# Altium footprint library WE-D-SUB.PcbLib: 41 footprints (part 1 of 3)
Each footprint in its own frame and in the unit in brackets; x right, y up, seen from the top. Pads: shape width x height; smd on the part's side, far side on the other; paste and mask are expansions set on the pad; w line width, h text height; cw(c..) or ccw(c..) is an arc to the next point about the centre after c.
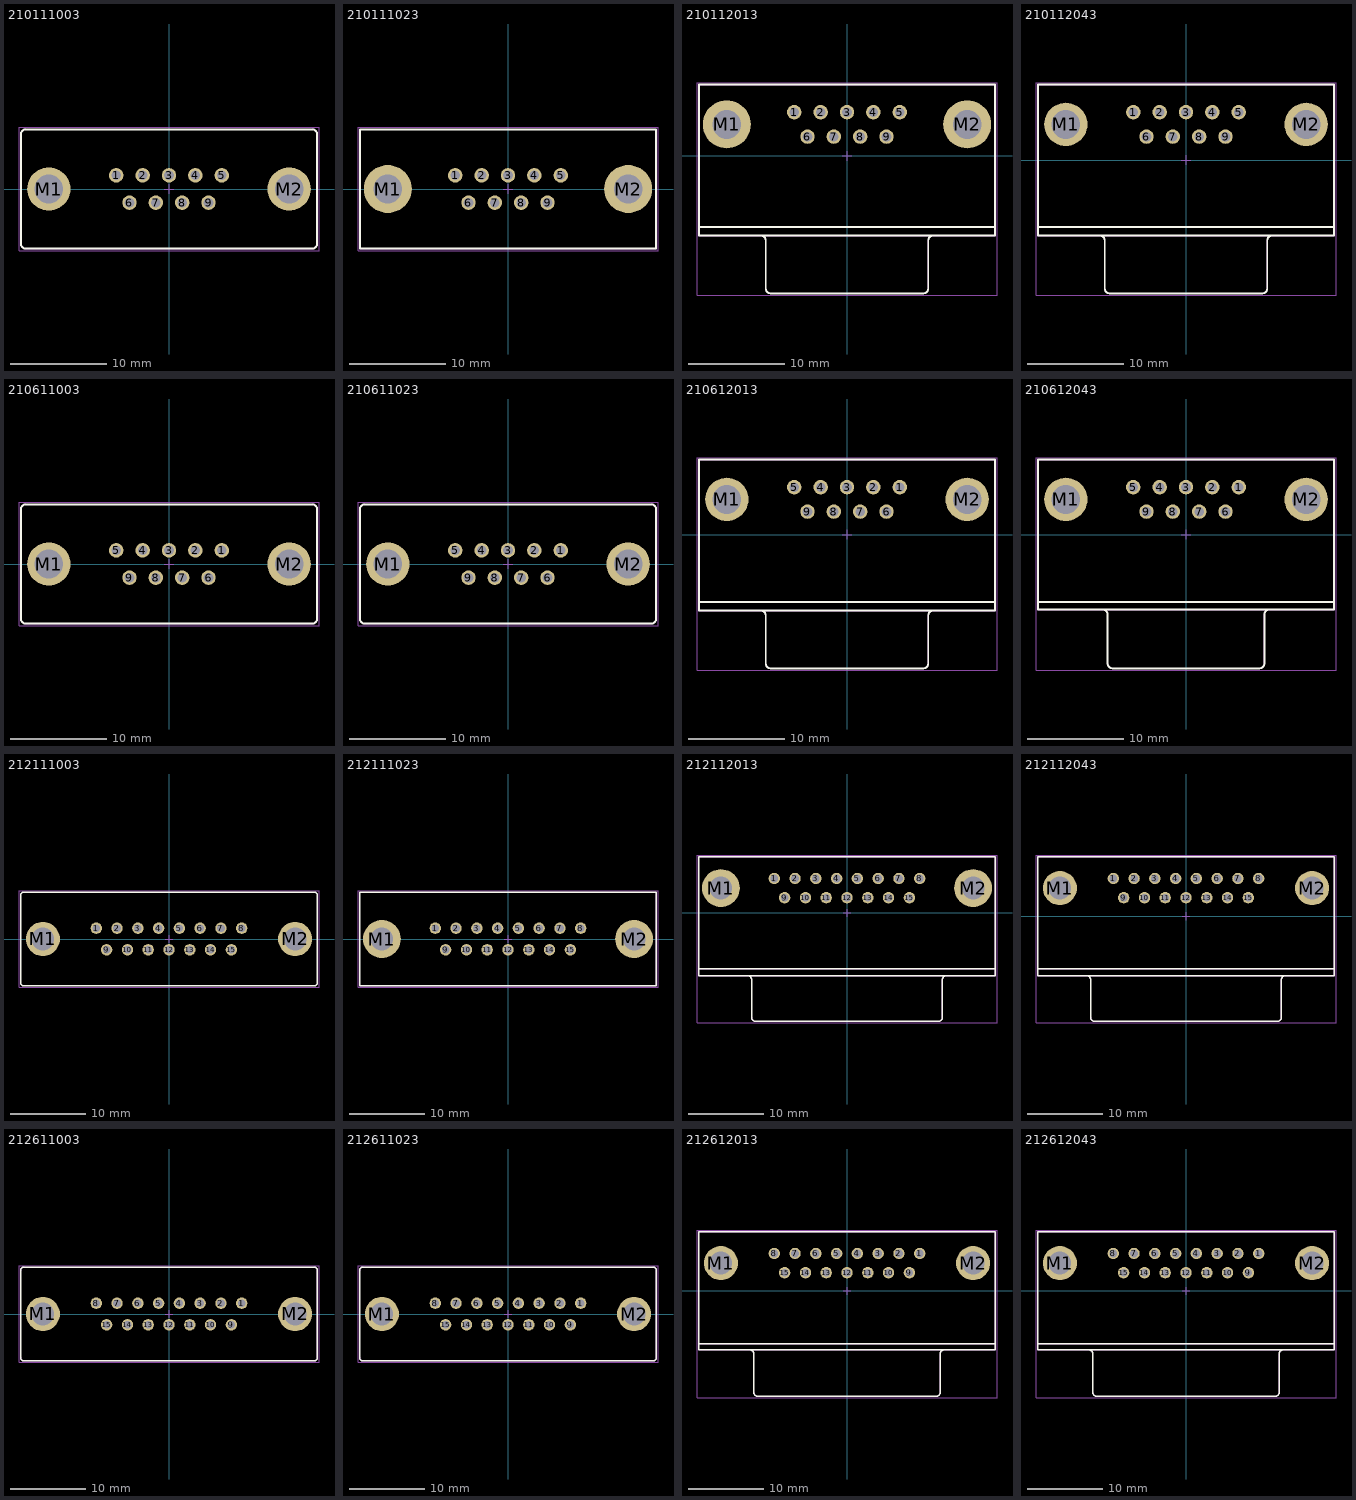
[diagram p0: the footprints below, top view; thin cyan lines are the x and y axes]

## 210111003 [mm] "D-SUB-Filter, Solder Pin Straight, Male, 09p"
height 12.2
pads (11):
  round 1.5 hole 1: 1(-5.49,1.42) 2(-2.74,1.42) 3(0,1.42) 4(2.74,1.42) 5(5.49,1.42) 6(-4.11,-1.42) 7(-1.37,-1.42) 8(1.37,-1.42) 9(4.11,-1.42)
  round 4.5 hole 3: M1(-12.5,0) M2(12.5,0)
Top Overlay:
  lines w0.2: 14.9,-6.2 ccw(c14.9,-5.7) 15.4,-5.7 15.4,5.7 ccw(c14.9,5.7) 14.9,6.2 ; 14.9,-6.2 -14.9,-6.2 cw(c-14.9,-5.7) -15.4,-5.7 -15.4,5.7 cw(c-14.9,5.7) -14.9,6.2 14.9,6.2 ; 14.9,-6.2 14.9,-6.2 ; 14.9,6.2 14.9,6.2
Top 3D Body:
  lines w0.1: 14.9,-6.2 ccw(c14.9,-5.7) 15.4,-5.7 15.4,5.7 ccw(c14.9,5.7) 14.9,6.2 ; 14.9,-6.2 14.9,-6.2 ; 14.9,-6.2 -14.9,-6.2 cw(c-14.9,-5.7) -15.4,-5.7 -15.4,5.7 cw(c-14.9,5.7) -14.9,6.2 14.9,6.2 ; 14.9,6.2 14.9,6.2
Top Courtyard:
  lines w0.05: -0.5,0 0.5,0 ; 0,-0.5 0,0.5 ; -15.6,-6.4 -15.6,6.4 15.6,6.4 15.6,-6.4 -15.6,-6.4
3D body "210111003.stp": height 11.9, standoff -5.1, extent -15.4,-6.2 15.4,6.2

## 210111023 [mm] "D-SUB-Filter, Solder Pin Straight, Male, 9p"
height 11.8
pads (11):
  round 1.5 hole 1: 1(-5.49,1.42) 2(-2.74,1.42) 3(0,1.42) 4(2.74,1.42) 5(5.49,1.42) 6(-4.11,-1.42) 7(-1.37,-1.42) 8(1.37,-1.42) 9(4.11,-1.42)
  round 5 hole 3: M1(-12.5,0) M2(12.5,0)
Top Overlay:
  lines w0.2: -15.4,-6.2 15.4,-6.2 15.4,6.2 -15.4,6.2 -15.4,-6.2
Top 3D Body:
  lines w0.1: -15.4,-6.2 -15.4,6.2 15.4,6.2 15.4,-6.2 -15.4,-6.2
Top Courtyard:
  lines w0.05: -0.5,0 0.5,0 ; 0,-0.5 0,0.5 ; -15.6,-6.4 -15.6,6.4 15.6,6.4 15.6,-6.4 -15.6,-6.4
3D body "210111023.stp": height 11.9, standoff -5.1, extent -15.4,-6.2 15.4,6.2

## 210112013 [mm] "D-SUB-Filter, Solder Pin Angled,  Male, 9p"
height 12.4
pads (11):
  round 1.5 hole 1: 1(-5.49,4.54) 2(-2.74,4.54) 3(0,4.54) 4(2.74,4.54) 5(5.49,4.54) 6(-4.11,2) 7(-1.37,2) 8(1.37,2) 9(4.11,2)
  round 5 hole 3: M1(-12.5,3.27) M2(12.5,3.27)
Top Overlay:
  lines w0.2: -15.4,-7.4 15.4,-7.4 ; -8.95,-8.3 cw(c-8.95,-8.8) -8.45,-8.8 -8.45,-13.8 ccw(c-7.95,-13.8) -7.95,-14.3 7.95,-14.3 ccw(c7.95,-13.8) 8.45,-13.8 8.45,-8.8 cw(c8.95,-8.8) 8.95,-8.3 ; -15.4,-8.3 -15.4,7.4 15.4,7.4 15.4,-8.3 -15.4,-8.3
Top 3D Body:
  lines w0.1: -15.4,-7.4 15.4,-7.4 ; -8.95,-8.3 cw(c-8.95,-8.8) -8.45,-8.8 -8.45,-13.8 ccw(c-7.95,-13.8) -7.95,-14.3 7.95,-14.3 ccw(c7.95,-13.8) 8.45,-13.8 8.45,-8.8 cw(c8.95,-8.8) 8.95,-8.3 ; -15.4,-8.3 15.4,-8.3 15.4,7.4 -15.4,7.4 -15.4,-8.3
Top Courtyard:
  lines w0.05: -0.5,0 0.5,0 ; 0,-0.5 0,0.5 ; -15.6,-14.5 -15.6,7.6 15.6,7.6 15.6,-14.5 -15.6,-14.5
3D body "210112013.stp": height 13.65, standoff -3.55, extent -15.4,-14.3 15.4,7.4

## 210112043 [mm] "D-SUB-Filter Bent 90¡ã THT, Male, 09p"
height 12.4
pads (11):
  round 1.5 hole 1: 1(-5.48,4.99) 2(-2.74,4.99) 3(0,4.99) 4(2.74,4.99) 5(5.48,4.99) 6(-4.11,2.45) 7(-1.37,2.45) 8(1.37,2.45) 9(4.11,2.45)
  round 4.5 hole 3: M1(-12.5,3.72) M2(12.5,3.72)
Top Overlay:
  lines w0.2: -15.4,-6.95 15.4,-6.95 ; -8.95,-7.85 cw(c-8.95,-8.35) -8.45,-8.35 -8.45,-13.35 ccw(c-7.95,-13.35) -7.95,-13.85 7.95,-13.85 ccw(c7.95,-13.35) 8.45,-13.35 8.45,-8.35 cw(c8.95,-8.35) 8.95,-7.85 ; -15.4,-7.85 -15.4,7.85 15.4,7.85 15.4,-7.85 -15.4,-7.85
Top 3D Body:
  lines w0.1: -15.4,-6.95 15.4,-6.95 ; -8.95,-7.85 cw(c-8.95,-8.35) -8.45,-8.35 -8.45,-13.35 ccw(c-7.95,-13.35) -7.95,-13.85 7.95,-13.85 ccw(c7.95,-13.35) 8.45,-13.35 8.45,-8.35 cw(c8.95,-8.35) 8.95,-7.85 ; -15.4,-7.85 15.4,-7.85 15.4,7.85 -15.4,7.85 -15.4,-7.85
Top Courtyard:
  lines w0.05: -0.5,0 0.5,0 ; 0,-0.5 0,0.5 ; -15.6,-14.05 -15.6,8.05 15.6,8.05 15.6,-14.05 -15.6,-14.05
3D body "210112043.stp": height 13.75, standoff -3.05, extent -15.4,-13.85 15.4,7.85

## 210611003 [mm] "D-SUB-Filter, Solder Pin Straight, Female, 09p"
height 12.2
pads (11):
  round 1.5 hole 1: 1(5.49,1.42) 2(2.74,1.42) 3(0,1.42) 4(-2.74,1.42) 5(-5.49,1.42) 6(4.11,-1.42) 7(1.37,-1.42) 8(-1.37,-1.42) 9(-4.11,-1.42)
  round 4.5 hole 3: M1(-12.5,0) M2(12.5,0)
Top Overlay:
  lines w0.2: -15.4,-5.7 ccw(c-14.9,-5.7) -14.9,-6.2 14.9,-6.2 ccw(c14.9,-5.7) 15.4,-5.7 15.4,5.7 ccw(c14.9,5.7) 14.9,6.2 -14.9,6.2 ccw(c-14.9,5.7) -15.4,5.7 -15.4,-5.7
Top 3D Body:
  lines w0.1: -15.4,-5.7 ccw(c-14.9,-5.7) -14.9,-6.2 14.9,-6.2 ccw(c14.9,-5.7) 15.4,-5.7 15.4,5.7 ccw(c14.9,5.7) 14.9,6.2 -14.9,6.2 ccw(c-14.9,5.7) -15.4,5.7 -15.4,-5.7
Top Courtyard:
  lines w0.05: -0.5,0 0.5,0 ; 0,-0.5 0,0.5 ; -15.6,-6.4 15.6,-6.4 15.6,6.4 -15.6,6.4 -15.6,-6.4
3D body "210611003.stp": height 11.9, standoff -5.1, extent -15.4,-6.2 15.4,6.2

## 210611023 [mm] "D-SUB-Filter, Solder Pin Straight, Female, 09p"
height 11.8
pads (11):
  round 1.5 hole 1: 1(5.49,1.42) 2(2.74,1.42) 3(0,1.42) 4(-2.74,1.42) 5(-5.49,1.42) 6(4.11,-1.42) 7(1.37,-1.42) 8(-1.37,-1.42) 9(-4.11,-1.42)
  round 4.5 hole 3: M1(-12.5,0) M2(12.5,0)
Top Overlay:
  lines w0.2: -15.4,-5.7 ccw(c-14.9,-5.7) -14.9,-6.2 14.9,-6.2 ccw(c14.9,-5.7) 15.4,-5.7 15.4,5.7 ccw(c14.9,5.7) 14.9,6.2 -14.9,6.2 ccw(c-14.9,5.7) -15.4,5.7 -15.4,-5.7
Top 3D Body:
  lines w0.1: -15.4,-5.7 ccw(c-14.9,-5.7) -14.9,-6.2 14.9,-6.2 ccw(c14.9,-5.7) 15.4,-5.7 15.4,5.7 ccw(c14.9,5.7) 14.9,6.2 -14.9,6.2 ccw(c-14.9,5.7) -15.4,5.7 -15.4,-5.7
Top Courtyard:
  lines w0.05: -0.5,0 0.5,0 ; 0,-0.5 0,0.5 ; -15.6,-6.4 -15.6,6.4 15.6,6.4 15.6,-6.4 -15.6,-6.4
3D body "210611023.stp": height 11.9, standoff -5.1, extent -15.4,-6.2 15.4,6.2

## 210612013 [mm] "D-SUB-Filter Bent 90¡ã THT, Female, 09p"
height 12.4
pads (11):
  round 1.5 hole 1: 1(5.49,4.94) 2(2.74,4.94) 3(0,4.94) 4(-2.74,4.94) 5(-5.49,4.94) 6(4.11,2.4) 7(1.37,2.4) 8(-1.37,2.4) 9(-4.11,2.4)
  round 4.5 hole 3: M1(-12.5,3.67) M2(12.5,3.67)
Top Overlay:
  lines w0.2: -15.4,-7 15.4,-7 ; -8.95,-7.9 cw(c-8.95,-8.4) -8.45,-8.4 -8.45,-13.4 ccw(c-7.95,-13.4) -7.95,-13.9 7.95,-13.9 ccw(c7.95,-13.4) 8.45,-13.4 8.45,-8.4 cw(c8.95,-8.4) 8.95,-7.9 ; -15.4,-7.9 -15.4,7.8 15.4,7.8 15.4,-7.9 -15.4,-7.9
Top 3D Body:
  lines w0.1: -15.4,-7 15.4,-7 ; -8.95,-7.9 cw(c-8.95,-8.4) -8.45,-8.4 -8.45,-13.4 ccw(c-7.95,-13.4) -7.95,-13.9 7.95,-13.9 ccw(c7.95,-13.4) 8.45,-13.4 8.45,-8.4 cw(c8.95,-8.4) 8.95,-7.9 ; -15.4,-7.9 15.4,-7.9 15.4,7.8 -15.4,7.8 -15.4,-7.9
Top Courtyard:
  lines w0.05: -0.5,0 0.5,0 ; 0,-0.5 0,0.5 ; -15.6,-14.1 -15.6,8 15.6,8 15.6,-14.1 -15.6,-14.1
3D body "210612013.stp": height 13.75, standoff -3.45, extent -15.4,-13.9 15.4,7.8

## 210612043 [mm] "D-SUB-Filter Bent 90¡ã THT, Female, 09p"
height 12.4
pads (11):
  round 1.5 hole 1: 1(5.49,4.94) 2(2.74,4.94) 3(0,4.94) 4(-2.74,4.94) 5(-5.49,4.94) 6(4.11,2.4) 7(1.37,2.4) 8(-1.37,2.4) 9(-4.11,2.4)
  round 4.5 hole 3: M1(-12.5,3.67) M2(12.5,3.67)
Top Overlay:
  lines w0.2: -15.4,-7 15.4,-7 ; -8.65,-7.8 cw(c-8.65,-8.3) -8.15,-8.3 -8.15,-13.4 ccw(c-7.65,-13.4) -7.65,-13.9 7.65,-13.9 ccw(c7.65,-13.4) 8.15,-13.4 8.15,-8.3 cw(c8.65,-8.3) 8.65,-7.8 ; -15.4,-7.8 -15.4,7.8 15.4,7.8 15.4,-7.8 -15.4,-7.8
Top 3D Body:
  lines w0.1: -15.4,-7 15.4,-7 ; -8.65,-7.8 cw(c-8.65,-8.3) -8.15,-8.3 -8.15,-13.4 ccw(c-7.65,-13.4) -7.65,-13.9 7.65,-13.9 ccw(c7.65,-13.4) 8.15,-13.4 8.15,-8.3 cw(c8.65,-8.3) 8.65,-7.8 ; -15.4,-7.8 15.4,-7.8 15.4,7.8 -15.4,7.8 -15.4,-7.8
Top Courtyard:
  lines w0.05: -0.5,0 0.5,0 ; 0,-0.5 0,0.5 ; -15.6,-14.1 -15.6,8 15.6,8 15.6,-14.1 -15.6,-14.1
3D body "210612043.stp": height 13.75, standoff -3.05, extent -15.4,-13.9 15.4,7.8

## 212111003 [mm] "D-SUB-Filter, Solder Pin Straight, Male, 15p"
height 12.2
pads (17):
  round 1.5 hole 1: 1(-9.6,1.42) 2(-6.86,1.42) 3(-4.11,1.42) 4(-1.37,1.42) 5(1.37,1.42) 6(4.11,1.42) 7(6.86,1.42) 8(9.6,1.42) 9(-8.23,-1.42) 10(-5.48,-1.42) 11(-2.74,-1.42) 12(0,-1.42) 13(2.74,-1.42) 14(5.48,-1.42) 15(8.23,-1.42)
  round 4.5 hole 3: M1(-16.65,0) M2(16.65,0)
Top Overlay:
  lines w0.2: -19.6,-5.7 ccw(c-19.1,-5.7) -19.1,-6.2 19.1,-6.2 ccw(c19.1,-5.7) 19.6,-5.7 19.6,5.7 ccw(c19.1,5.7) 19.1,6.2 -19.1,6.2 ccw(c-19.1,5.7) -19.6,5.7 -19.6,-5.7
Top Courtyard:
  lines w0.05: -0.5,0 0.5,0 ; 0,-0.5 0,0.5 ; -19.8,-6.4 -19.8,6.4 19.8,6.4 19.8,-6.4 -19.8,-6.4
3D body "212111003.stp": height 11.9, standoff -5.1, extent -19.6,-6.2 19.6,6.2

## 212111023 [mm] "D-SUB-Filter, Solder Pin Straight, Male, 15p"
height 11.8
pads (17):
  round 1.5 hole 1: 1(-9.6,1.42) 2(-6.86,1.42) 3(-4.11,1.42) 4(-1.37,1.42) 5(1.37,1.42) 6(4.11,1.42) 7(6.86,1.42) 8(9.6,1.42) 9(-8.23,-1.42) 10(-5.48,-1.42) 11(-2.74,-1.42) 12(0,-1.42) 13(2.74,-1.42) 14(5.48,-1.42) 15(8.23,-1.42)
  round 5 hole 3: M1(-16.65,0) M2(16.65,0)
Top Overlay:
  lines w0.2: -19.6,-6.2 19.6,-6.2 19.6,6.2 -19.6,6.2 -19.6,-6.2
Top 3D Body:
  lines w0.1: -19.6,-6.2 -19.6,6.2 19.6,6.2 19.6,-6.2 -19.6,-6.2
Top Courtyard:
  lines w0.05: -0.5,0 0.5,0 ; 0,-0.5 0,0.5 ; -19.8,-6.4 -19.8,6.4 19.8,6.4 19.8,-6.4 -19.8,-6.4
3D body "212111023.stp": height 11.9, standoff -5.1, extent -19.6,-6.2 19.6,6.2

## 212112013 [mm] "D-SUB-Filter, Solder Pin Angled,  Male, 15p"
height 12.4
pads (17):
  round 1.5 hole 1: 1(-9.6,4.54) 2(-6.86,4.54) 3(-4.11,4.54) 4(-1.37,4.54) 5(1.37,4.54) 6(4.11,4.54) 7(6.86,4.54) 8(9.6,4.54) 9(-8.23,2) 10(-5.48,2) 11(-2.74,2) 12(0,2) 13(2.74,2) 14(5.48,2) 15(8.23,2)
  round 5 hole 3: M1(-16.65,3.27) M2(16.65,3.27)
Top Overlay:
  lines w0.2: -19.6,-7.4 19.6,-7.4 ; -13.1,-8.3 cw(c-13.1,-8.8) -12.6,-8.8 -12.6,-13.8 ccw(c-12.1,-13.8) -12.1,-14.3 12.1,-14.3 ccw(c12.1,-13.8) 12.6,-13.8 12.6,-8.8 cw(c13.1,-8.8) 13.1,-8.3 ; -19.6,-8.3 19.6,-8.3 19.6,7.4 -19.6,7.4 -19.6,-8.3
Top 3D Body:
  lines w0.1: -19.6,-7.4 19.6,-7.4 ; -13.1,-8.3 cw(c-13.1,-8.8) -12.6,-8.8 -12.6,-13.8 ccw(c-12.1,-13.8) -12.1,-14.3 12.1,-14.3 ccw(c12.1,-13.8) 12.6,-13.8 12.6,-8.8 cw(c13.1,-8.8) 13.1,-8.3 ; -19.6,-8.3 -19.6,7.4 19.6,7.4 19.6,-8.3 -19.6,-8.3
Top Courtyard:
  lines w0.05: -0.5,0 0.5,0 ; 0,-0.5 0,0.5 ; -19.8,-14.5 19.8,-14.5 19.8,7.6 -19.8,7.6 -19.8,-14.5
3D body "212112013.stp": height 13.65, standoff -3.55, extent -19.6,-14.3 19.6,7.4

## 212112043 [mm] "D-SUB-Filter Bent 90¡ã THT, Male, 15p"
height 12.4
pads (17):
  round 1.5 hole 1: 1(-9.59,4.99) 2(-6.85,4.99) 3(-4.11,4.99) 4(-1.37,4.99) 5(1.37,4.99) 6(4.11,4.99) 7(6.85,4.99) 8(9.59,4.99) 9(-8.22,2.45) 10(-5.48,2.45) 11(-2.74,2.45) 12(0,2.45) 13(2.74,2.45) 14(5.48,2.45) 15(8.22,2.45)
  round 4.5 hole 3: M1(-16.65,3.72) M2(16.65,3.72)
Top Overlay:
  lines w0.2: -19.6,-6.95 19.6,-6.95 ; -13.1,-7.85 cw(c-13.1,-8.35) -12.6,-8.35 -12.6,-13.35 ccw(c-12.1,-13.35) -12.1,-13.85 12.1,-13.85 ccw(c12.1,-13.35) 12.6,-13.35 12.6,-8.35 cw(c13.1,-8.35) 13.1,-7.85 ; -19.6,-7.85 19.6,-7.85 19.6,7.85 -19.6,7.85 -19.6,-7.85
Top 3D Body:
  lines w0.1: -19.6,-6.95 19.6,-6.95 ; -13.1,-7.85 cw(c-13.1,-8.35) -12.6,-8.35 -12.6,-13.35 ccw(c-12.1,-13.35) -12.1,-13.85 12.1,-13.85 ccw(c12.1,-13.35) 12.6,-13.35 12.6,-8.35 cw(c13.1,-8.35) 13.1,-7.85 ; -19.6,-7.85 -19.6,7.85 19.6,7.85 19.6,-7.85 -19.6,-7.85
Top Courtyard:
  lines w0.05: -0.5,0 0.5,0 ; 0,-0.5 0,0.5 ; -19.8,-14.05 -19.8,8.05 19.8,8.05 19.8,-14.05 -19.8,-14.05
3D body "212112043.stp": height 13.75, standoff -3.05, extent -19.6,-13.85 19.6,7.85

## 212611003 [mm] "D-SUB-Filter, Solder Pin Straight, Female, 15p"
height 12.2
pads (17):
  round 1.5 hole 1: 1(9.6,1.42) 2(6.86,1.42) 3(4.11,1.42) 4(1.37,1.42) 5(-1.37,1.42) 6(-4.11,1.42) 7(-6.86,1.42) 8(-9.6,1.42) 9(8.23,-1.42) 10(5.48,-1.42) 11(2.74,-1.42) 12(0,-1.42) 13(-2.74,-1.42) 14(-5.48,-1.42) 15(-8.23,-1.42)
  round 4.5 hole 3: M1(-16.65,0) M2(16.65,0)
Top Overlay:
  lines w0.2: -19.6,-5.7 ccw(c-19.1,-5.7) -19.1,-6.2 19.1,-6.2 ccw(c19.1,-5.7) 19.6,-5.7 19.6,5.7 ccw(c19.1,5.7) 19.1,6.2 -19.1,6.2 ccw(c-19.1,5.7) -19.6,5.7 -19.6,-5.7
Top 3D Body:
  lines w0.1: -19.6,-5.7 ccw(c-19.1,-5.7) -19.1,-6.2 19.1,-6.2 ccw(c19.1,-5.7) 19.6,-5.7 19.6,5.7 ccw(c19.1,5.7) 19.1,6.2 -19.1,6.2 ccw(c-19.1,5.7) -19.6,5.7 -19.6,-5.7
Top Courtyard:
  lines w0.05: -0.5,0 0.5,0 ; 0,-0.5 0,0.5 ; -19.8,-6.4 -19.8,6.4 19.8,6.4 19.8,-6.4 -19.8,-6.4
3D body "212611003.stp": height 11.9, standoff -5.1, extent -19.6,-6.2 19.6,6.2

## 212611023 [mm] "D-SUB-Filter, Solder Pin Straight, Female, 15p"
height 11.8
pads (17):
  round 1.5 hole 1: 1(9.6,1.42) 2(6.86,1.42) 3(4.11,1.42) 4(1.37,1.42) 5(-1.37,1.42) 6(-4.11,1.42) 7(-6.86,1.42) 8(-9.6,1.42) 9(8.23,-1.42) 10(5.48,-1.42) 11(2.74,-1.42) 12(0,-1.42) 13(-2.74,-1.42) 14(-5.48,-1.42) 15(-8.23,-1.42)
  round 4.5 hole 3: M1(-16.65,0) M2(16.65,0)
Top Overlay:
  lines w0.2: -19.6,-5.7 ccw(c-19.1,-5.7) -19.1,-6.2 19.1,-6.2 ccw(c19.1,-5.7) 19.6,-5.7 19.6,5.7 ccw(c19.1,5.7) 19.1,6.2 -19.1,6.2 ccw(c-19.1,5.7) -19.6,5.7 -19.6,-5.7
Top 3D Body:
  lines w0.1: -19.6,-5.7 ccw(c-19.1,-5.7) -19.1,-6.2 19.1,-6.2 ccw(c19.1,-5.7) 19.6,-5.7 19.6,5.7 ccw(c19.1,5.7) 19.1,6.2 -19.1,6.2 ccw(c-19.1,5.7) -19.6,5.7 -19.6,-5.7
Top Courtyard:
  lines w0.05: -0.5,0 0.5,0 ; 0,-0.5 0,0.5 ; -19.8,-6.4 -19.8,6.4 19.8,6.4 19.8,-6.4 -19.8,-6.4
3D body "212611023.stp": height 11.9, standoff -5.1, extent -19.6,-6.2 19.6,6.2

## 212612013 [mm] "D-SUB-Filter Bent 90¡ã THT, Female, 15p"
height 12.4
pads (17):
  round 1.5 hole 1: 1(9.6,4.94) 2(6.86,4.94) 3(4.11,4.94) 4(1.37,4.94) 5(-1.37,4.94) 6(-4.11,4.94) 7(-6.86,4.94) 8(-9.6,4.94) 9(8.23,2.4) 10(5.48,2.4) 11(2.74,2.4) 12(0,2.4) 13(-2.74,2.4) 14(-5.48,2.4) 15(-8.23,2.4)
  round 4.5 hole 3: M1(-16.65,3.67) M2(16.65,3.67)
Top Overlay:
  lines w0.2: -19.6,-7 19.6,-7 ; -12.8,-7.8 cw(c-12.8,-8.3) -12.3,-8.3 -12.3,-13.4 ccw(c-11.8,-13.4) -11.8,-13.9 11.8,-13.9 ccw(c11.8,-13.4) 12.3,-13.4 12.3,-8.3 cw(c12.8,-8.3) 12.8,-7.8 ; -19.6,-7.8 19.6,-7.8 19.6,7.8 -19.6,7.8 -19.6,-7.8
Top 3D Body:
  lines w0.1: -19.6,-7 19.6,-7 ; -12.8,-7.8 cw(c-12.8,-8.3) -12.3,-8.3 -12.3,-13.4 ccw(c-11.8,-13.4) -11.8,-13.9 11.8,-13.9 ccw(c11.8,-13.4) 12.3,-13.4 12.3,-8.3 cw(c12.8,-8.3) 12.8,-7.8 ; -19.6,-7.8 -19.6,7.8 19.6,7.8 19.6,-7.8 -19.6,-7.8
Top Courtyard:
  lines w0.05: -0.5,0 0.5,0 ; 0,-0.5 0,0.5 ; -19.8,-14.1 19.8,-14.1 19.8,8 -19.8,8 -19.8,-14.1
3D body "212612013.stp": height 13.75, standoff -3.45, extent -19.6,-13.9 19.6,7.8

## 212612043 [mm] "D-SUB-Filter Bent 90¡ã THT, Female, 15p"
height 12.4
pads (17):
  round 1.5 hole 1: 1(9.6,4.94) 2(6.86,4.94) 3(4.11,4.94) 4(1.37,4.94) 5(-1.37,4.94) 6(-4.11,4.94) 7(-6.86,4.94) 8(-9.6,4.94) 9(8.23,2.4) 10(5.48,2.4) 11(2.74,2.4) 12(0,2.4) 13(-2.74,2.4) 14(-5.48,2.4) 15(-8.23,2.4)
  round 4.5 hole 3: M1(-16.65,3.67) M2(16.65,3.67)
Top Overlay:
  lines w0.2: -19.6,-7 19.6,-7 ; -12.8,-7.8 cw(c-12.8,-8.3) -12.3,-8.3 -12.3,-13.4 ccw(c-11.8,-13.4) -11.8,-13.9 11.76,-13.9 ; 11.8,-13.9 ccw(c11.8,-13.4) 12.3,-13.4 12.3,-8.3 cw(c12.8,-8.3) 12.8,-7.8 ; -19.6,-7.8 -19.6,7.8 19.6,7.8 19.6,-7.8 -19.6,-7.8
Top 3D Body:
  lines w0.1: -19.6,-7 19.6,-7 ; -12.8,-7.8 cw(c-12.8,-8.3) -12.3,-8.3 -12.3,-13.4 ccw(c-11.8,-13.4) -11.8,-13.9 11.76,-13.9 ; 11.8,-13.9 ccw(c11.8,-13.4) 12.3,-13.4 12.3,-8.3 cw(c12.8,-8.3) 12.8,-7.8 ; -19.6,-7.8 19.6,-7.8 19.6,7.8 -19.6,7.8 -19.6,-7.8
Top Courtyard:
  lines w0.05: -0.5,0 0.5,0 ; 0,-0.5 0,0.5 ; -19.8,-14.1 -19.8,8 19.8,8 19.8,-14.1 -19.8,-14.1
3D body "212612043.stp": height 13.75, standoff -3.05, extent -19.6,-13.9 19.6,7.8